# Altium footprint library AudioMoth 1.1.PCBLIB: 193 footprints (part 1 of 13)
Each footprint in its own frame and in the unit in brackets; x right, y up, seen from the top. Pads: shape width x height; smd on the part's side, far side on the other; paste and mask are expansions set on the pad; w line width, h text height; cw(c..) or ccw(c..) is an arc to the next point about the centre after c.
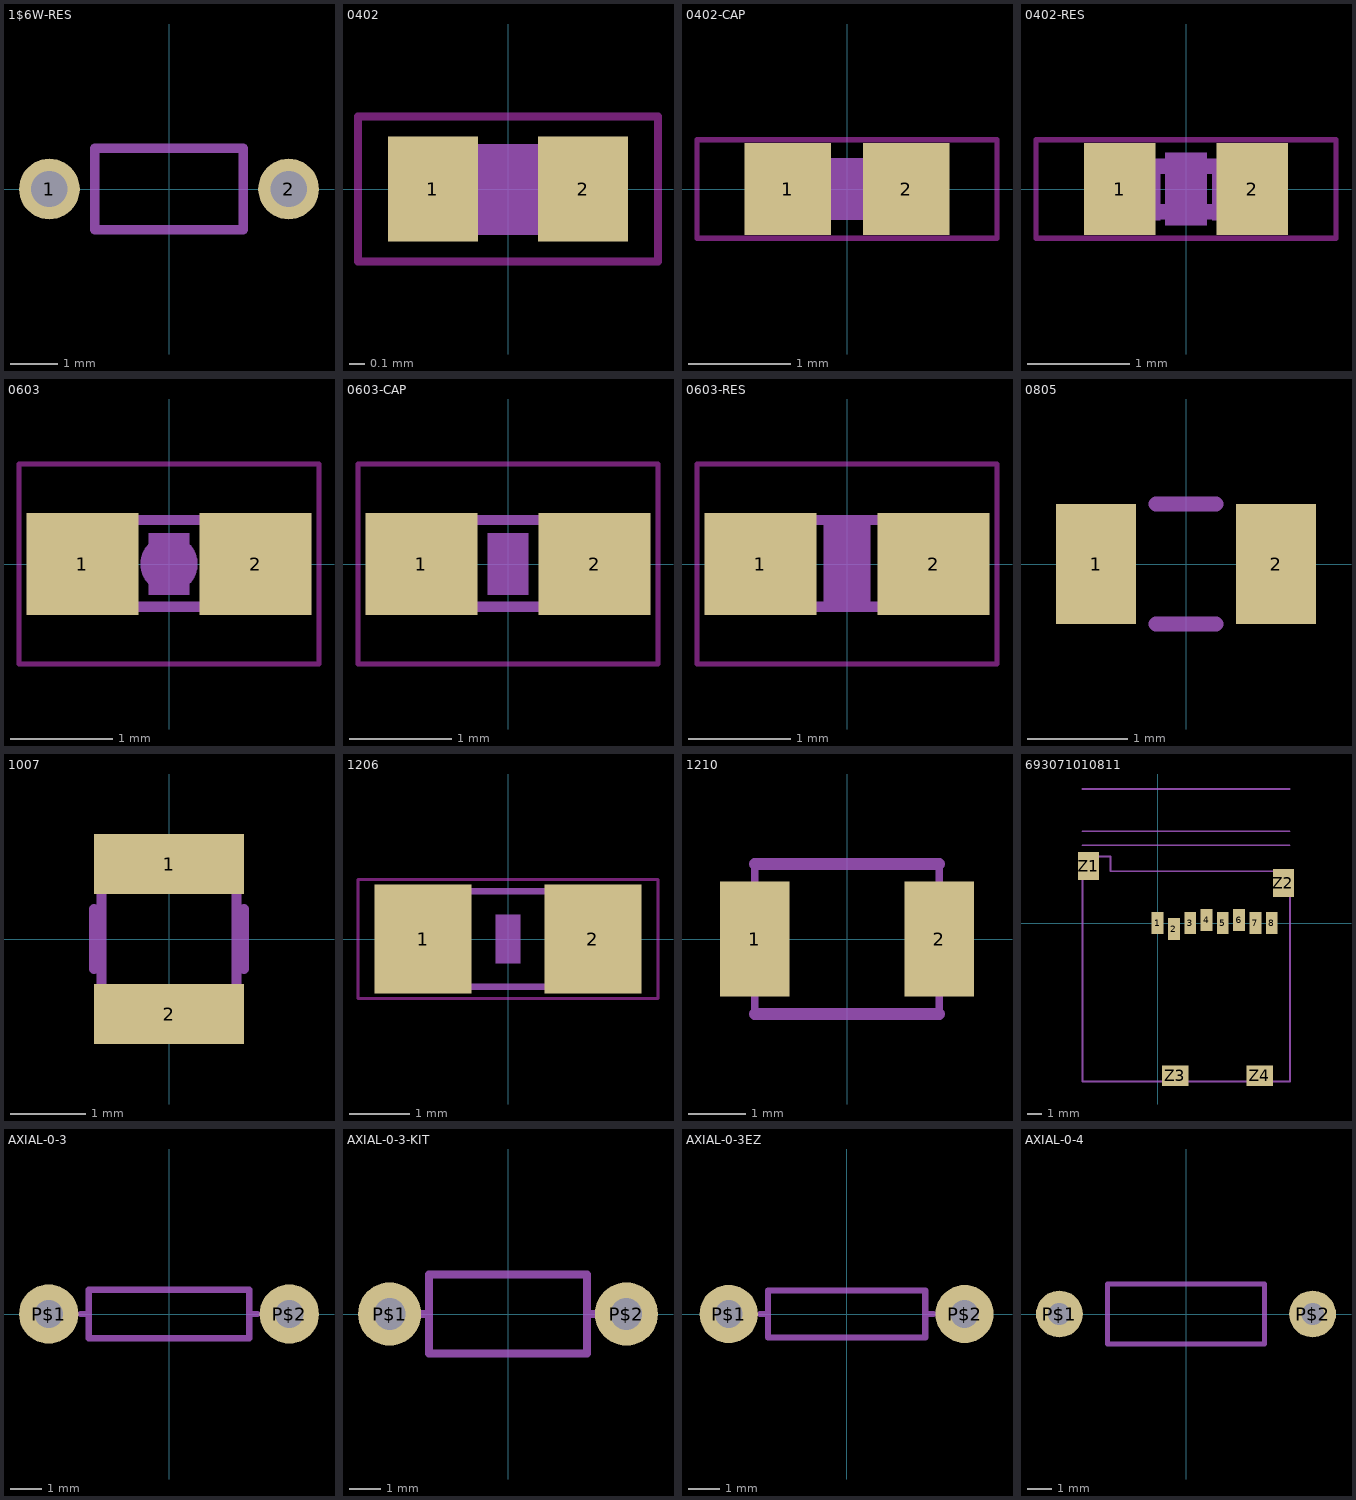
[diagram p0: the footprints below, top view; thin cyan lines are the x and y axes]

## 1$6W-RES [mil]
pads (2):
  round 50 hole 30: 1(-98.43,0) 2(98.43,0)
tPlace:
  lines w8: -61.02,-33.46 -61.02,33.46 61.02,33.46 61.02,-33.46 -61.02,-33.46

## 0402 [mm]
pads (2):
  rect 0.6x0.7 smd: 1(-0.5,0) 2(0.5,0)
Top keep-out:
  lines w0.051: -1,-0.483 1,-0.483 1,0.483 -1,0.483 -1,-0.483
tDocu:
  region: -0.554,-0.305 -0.554,0.295 -0.254,0.295 -0.254,-0.305
  region: 0.259,-0.305 0.259,0.295 0.559,0.295 0.559,-0.305
  lines w0.152: -0.26,-0.229 0.271,-0.229 ; -0.254,0.219 0.27,0.219
tGlue:
  region: -0.2,-0.3 -0.2,0.3 0.2,0.3 0.2,-0.3

## 0402-CAP [mm]
pads (2):
  rect 0.85x0.9 smd: 1(-0.58,0) 2(0.58,0)
Top keep-out:
  lines w0.051: -1.473,-0.483 1.473,-0.483 1.473,0.483 -1.473,0.483 -1.473,-0.483
tDocu:
  region: -0.554,-0.305 -0.554,0.295 -0.254,0.295 -0.254,-0.305
  region: 0.259,-0.305 0.259,0.295 0.559,0.295 0.559,-0.305
  lines w0.152: -0.245,-0.224 0.245,-0.224 ; -0.245,0.224 0.245,0.224
tPlace:
  lines w0.406: 0,-0.03 0,0.03
tGlue:
  region: -0.2,-0.3 -0.2,0.3 0.2,0.3 0.2,-0.3

## 0402-RES [mm]
pads (2):
  rect 0.7x0.9 smd: 1(-0.65,0) 2(0.65,0)
Top keep-out:
  lines w0.051: -1.473,-0.483 1.473,-0.483 1.473,0.483 -1.473,0.483 -1.473,-0.483
tDocu:
  region: -0.554,-0.305 -0.554,0.295 -0.254,0.295 -0.254,-0.305
  region: 0.259,-0.305 0.259,0.295 0.559,0.295 0.559,-0.305
  lines w0.152: -0.245,-0.224 0.245,-0.224 ; -0.245,0.224 0.245,0.224
tPlace:
  region: -0.203,-0.356 -0.203,0.356 0.203,0.356 0.203,-0.356
tGlue:
  region: -0.2,-0.3 -0.2,0.3 0.2,0.3 0.2,-0.3

## 0603 [mm]
pads (2):
  rect 1.1x1 smd: 1(-0.85,0) 2(0.85,0)
Top keep-out:
  lines w0.051: -1.473,-0.983 1.473,-0.983 1.473,0.983 -1.473,0.983 -1.473,-0.983
tDocu:
  region: -0.838,-0.47 -0.838,0.48 -0.338,0.48 -0.338,-0.47
  region: 0.33,-0.47 0.33,0.48 0.83,0.48 0.83,-0.47
  lines w0.102: -0.356,-0.419 0.356,-0.419 ; -0.356,0.432 0.356,0.432
tPlace:
  circle w0.127: c0,0 r0.127
  circle w0.127: c0,0 r0.025
  circle w0.127: c0,0 r0.218
tGlue:
  region: -0.2,-0.3 -0.2,0.3 0.2,0.3 0.2,-0.3

## 0603-CAP [mm]
pads (2):
  rect 1.1x1 smd: 1(-0.85,0) 2(0.85,0)
Top keep-out:
  lines w0.051: -1.473,-0.983 1.473,-0.983 1.473,0.983 -1.473,0.983 -1.473,-0.983
tDocu:
  region: -0.838,-0.47 -0.838,0.48 -0.338,0.48 -0.338,-0.47
  region: 0.33,-0.47 0.33,0.48 0.83,0.48 0.83,-0.47
  lines w0.102: -0.356,-0.419 0.356,-0.419 ; -0.356,0.432 0.356,0.432
tPlace:
  lines w0.381: 0,-0.028 0,0.028
tGlue:
  region: -0.2,-0.3 -0.2,0.3 0.2,0.3 0.2,-0.3

## 0603-RES [mm]
pads (2):
  rect 1.1x1 smd: 1(-0.85,0) 2(0.85,0)
Top keep-out:
  lines w0.051: -1.473,-0.983 1.473,-0.983 1.473,0.983 -1.473,0.983 -1.473,-0.983
tDocu:
  region: -0.838,-0.47 -0.838,0.48 -0.338,0.48 -0.338,-0.47
  region: 0.33,-0.47 0.33,0.48 0.83,0.48 0.83,-0.47
  lines w0.102: -0.356,-0.419 0.356,-0.419 ; -0.356,0.432 0.356,0.432
tPlace:
  region: -0.229,-0.381 -0.229,0.381 0.229,0.381 0.229,-0.381
tGlue:
  region: -0.2,-0.3 -0.2,0.3 0.2,0.3 0.2,-0.3

## 0805 [mil]
pads (2):
  rect 31.5x47.24 smd: 1(-35.43,0) 2(35.43,0)
tPlace:
  lines w6: -11.81,-23.62 11.81,-23.62 ; -11.81,23.62 11.81,23.62

## 1007 [mm]
pads (2):
  rect 2x0.8 smd: 1(0,1) 2(0,-1)
tDocu:
  lines w0.127: -0.9,-1.25 -0.9,1.25 0.9,1.25 0.9,-1.25 -0.9,-1.25
tPlace:
  lines w0.127: -1,-0.4 -1,0.4 ; 1,-0.4 1,0.4

## 1206 [mm]
pads (2):
  rect 1.6x1.8 smd: 1(-1.4,0) 2(1.4,0)
Top keep-out:
  lines w0.051: -2.473,-0.983 2.473,-0.983 2.473,0.983 -2.473,0.983 -2.473,-0.983
tDocu:
  region: -1.702,-0.851 -1.702,0.849 -0.952,0.849 -0.952,-0.851
  region: 0.952,-0.849 0.952,0.851 1.702,0.851 1.702,-0.849
  lines w0.102: -0.965,-0.787 0.965,-0.787 ; -0.965,0.787 0.965,0.787
tGlue:
  region: -0.2,-0.4 -0.2,0.4 0.2,0.4 0.2,-0.4

## 1210 [mm]
pads (2):
  rect 1.2x2 smd: 1(-1.6,0) 2(1.6,0)
tDocu:
  lines w0.127: -1.6,-1.3 1.6,-1.3 1.6,1.3 -1.6,1.3 -1.6,-1.3
tPlace:
  lines w0.203: -1.6,-1.3 1.6,-1.3 ; -1.6,1.3 1.6,1.3

## 693071010811 [mil]
pads (12):
  rect 31.5x59.06 smd: 1(0,0) 2(43.31,-15.75) 3(86.61,0) 4(129.92,7.87) 5(173.23,0) 6(216.54,7.87) 7(259.84,0) 8(303.15,0)
  rect 55.12x74.8 smd: Z1(-183.46,151.57) Z2(334.25,106.3)
  rect 70.87x55.12 smd: Z3(47.24,-405.51) Z4(271.26,-405.51)
tDocu:
  lines w5: -200,206.69 350,206.69 ; -200,244.09 350,244.09 ; -200,356.3 350,356.3 ; -199.21,-421.26 -199.21,177.17 -125,177.17 -125,137.8 351.97,137.8 351.97,-421.26 -199.21,-421.26
  text "2" at 50,50 h77.5
  text "4" at 150,50 h77.5
  text "6" at 250,50 h77.5
  text "8" at 300,-100 h77.5
tPlace:
  lines w5: -199.21,104.33 -199.21,-421.26 0,-421.26 ; -148.03,177.17 -125,177.17 -125,137.8 296.85,137.8 ; 92.52,-421.26 226.38,-421.26 ; 316.93,-421.26 351.97,-421.26 351.97,61.02

## AXIAL-0-3 [mil]
pads (2):
  round 74 hole 35.43: P$1(-150,0) P$2(150,0)
tPlace:
  lines w8: -110,0 -100,0 ; 110,0 100,0 ; -100,0 -100,-30 100,-30 100,0 ; -100,0 -100,30 100,30 100,0

## AXIAL-0-3-KIT [mil]
pads (2):
  round 80 hole 40: P$1(-150,0) P$2(150,0)
Top Solder:
  region: 150.3,-17.2 146.9,-17.28 140.55,-14.82 135.63,-10.13 132.88,-3.9 132.8,-0.5 132.71,3.07 135.28,9.74 140.2,14.91 146.73,17.81 150.3,17.9 153.82,17.84 160.28,15.04 165.18,9.97 167.76,3.42 167.7,-0.1 167.67,-3.53 164.99,-9.85 160.09,-14.66 153.73,-17.23 150.3,-17.2
  region: -150,-17.5 -153.4,-17.58 -159.75,-15.12 -164.67,-10.43 -167.42,-4.2 -167.5,-0.8 -167.59,2.77 -165.02,9.44 -160.1,14.61 -153.57,17.51 -150,17.6 -146.48,17.54 -140.02,14.74 -135.12,9.67 -132.54,3.12 -132.6,-0.4 -132.63,-3.83 -135.31,-10.15 -140.21,-14.96 -146.57,-17.53 -150,-17.5
Bottom Solder:
  region: 150.4,-37.2 146.75,-37.25 139.56,-35.92 132.77,-33.21 126.64,-29.24 121.4,-24.14 117.26,-18.12 114.37,-11.4 112.85,-4.25 112.8,-0.6 112.76,3.14 114.13,10.49 116.9,17.43 120.98,23.69 126.21,29.04 132.37,33.27 139.25,36.21 146.56,37.76 150.3,37.8 154.04,37.75 161.35,36.18 168.21,33.22 174.37,28.98 179.58,23.61 183.64,17.34 186.4,10.39 187.75,3.04 187.7,-0.7 187.66,-4.33 186.17,-11.45 183.31,-18.13 179.21,-24.14 174.01,-29.22 167.93,-33.19 161.18,-35.9 154.03,-37.24 150.4,-37.2
  region: -149.9,-37.5 -153.55,-37.55 -160.74,-36.22 -167.53,-33.51 -173.66,-29.54 -178.9,-24.44 -183.04,-18.42 -185.93,-11.7 -187.45,-4.55 -187.5,-0.9 -187.54,2.84 -186.17,10.19 -183.4,17.13 -179.32,23.39 -174.09,28.74 -167.93,32.97 -161.05,35.91 -153.74,37.46 -150,37.5 -146.26,37.45 -138.95,35.88 -132.09,32.92 -125.93,28.68 -120.72,23.31 -116.66,17.04 -113.9,10.09 -112.55,2.74 -112.6,-1 -112.64,-4.63 -114.13,-11.75 -116.99,-18.43 -121.09,-24.44 -126.29,-29.52 -132.37,-33.49 -139.12,-36.2 -146.27,-37.54 -149.9,-37.5
tPlace:
  lines w10: -110,0 -100,0 ; 110,0 100,0 ; -100,0 -100,-50 100,-50 100,0 ; -100,0 -100,50 100,50 100,0

## AXIAL-0-3EZ [mil]
pads (2):
  round 74 hole 35.43: P$1(-150,0) P$2(150,0)
Top Solder:
  circle w0: c-150,0 r20
  circle w0: c150,0 r20.62
Bottom Solder:
  circle w0: c-150,0 r40.31
  circle w0: c150,0 r41.23
tPlace:
  lines w8: -110,0 -100,0 ; 110,0 100,0 ; -100,0 -100,-30 100,-30 100,0 ; -100,0 -100,30 100,30 100,0

## AXIAL-0-4 [mil]
pads (2):
  round 74 hole 35.43: P$1(-200,0) P$2(200,0)
tPlace:
  lines w8: -124.02,-47.24 -124.02,47.24 124.02,47.24 124.02,-47.24 -124.02,-47.24